# Altium integrated library 106.IntLib: 1 symbol
Pins are listed as number, name and electrical type; pins without a type are passive.

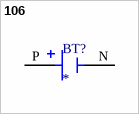
[diagram p0: symbol 106]

## 106
designator BT?
Battery Holder, Heavy Duty, THM, Plastic, 1 Cell, 20mm | Keystone Electronics 106; MP: 106; SnapEDA_Link: https://www.snapeda.com/parts/106/Keystone/view-part/?ref=snap; Package: None; Value: *; MF: Keystone Electronics; Check_prices: https://www.snapeda.com/parts/106/Keystone/view-part/?ref=eda
footprint BAT_106
pins: N NEG, P POS